# Altium footprint library LM1117MPX-33NOPB.PcbLib: 3 footprints
Each footprint in its own frame and in the unit in brackets; x right, y up, seen from the top. Pads: shape width x height; smd on the part's side, far side on the other; paste and mask are expansions set on the pad; w line width, h text height; cw(c..) or ccw(c..) is an arc to the next point about the centre after c.
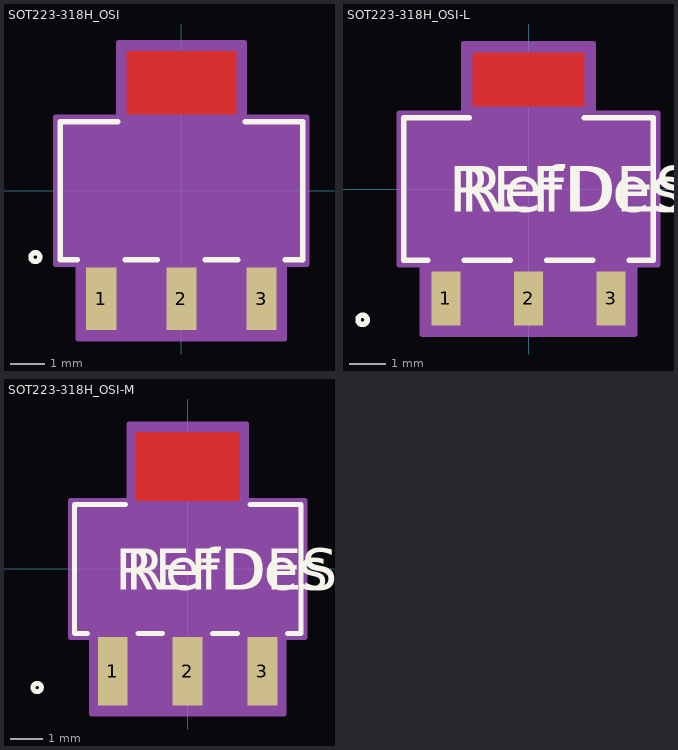
[diagram p0: the footprints below, top view; thin cyan lines are the x and y axes]

## SOT223-318H_OSI [mil]
pads (3):
  rect 34x71 smd paste+0 mask+0: 1(-90.55,-122) 2(0,-122) 3(90.55,-122)
Top Layer:
  region: 62,86.5 62,157.5 -62,157.5 -62,86.5
Top Overlay:
  circle w6: c-165,-75 r5
  lines w6: -117.52,-78 -137,-78 -137,78 -71.97,78 ; -63.58,-78 -26.97,-78 ; 26.97,-78 63.58,-78 ; 71.97,78 137,78 137,-78 117.52,-78
Top Paste:
  region: 62,86.5 62,157.5 -62,157.5 -62,86.5
Top Solder:
  region: 63,72.5 63,171.5 -63,171.5 -63,72.5
Mechanical 13:
  circle w0: c-122,-63 r5
  lines w1: -132,-73 132,-73 132,73 -132,73 -132,-73 ; -106.55,-143.5 -106.55,-73 -74.55,-73 -74.55,-143.5 -106.55,-143.5 ; -61,73 61,73 61,143.5 -61,143.5 -61,73 ; -16,-143.5 -16,-73 16,-73 16,-143.5 -16,-143.5 ; 74.55,-143.5 74.55,-73 106.55,-73 106.55,-143.5 74.55,-143.5
Mechanical 15:
  region: -142,-83 -142,83 -71,83 -71,167.5 71,167.5 71,83 142,83 142,-83 116.55,-83 116.55,-167.5 -116.55,-167.5 -116.55,-83
  lines w6: -142,-83 -142,83 -71,83 -71,167.5 71,167.5 71,83 142,83 142,-83 116.55,-83 116.55,-167.5 -116.55,-167.5 -116.55,-83 -142,-83
3D body "SOT223-318H_OSI.step": height 71.1, standoff 0, extent -132.01,-143.5 132.01,143.5

## SOT223-318H_OSI-L [mil]
pads (3):
  rect 32x59 smd paste+0 mask+0: 1(-90.55,-120) 2(0,-120) 3(90.55,-120)
Top Layer:
  region: 61,90.5 61,149.5 -61,149.5 -61,90.5
Top Overlay:
  circle w6: c-182,-143.5 r5
  lines w6: -110.47,-78 -137,-78 -137,78 -64.92,78 ; -70.63,-78 -19.92,-78 ; 19.92,-78 70.63,-78 ; 61,78 137,78 137,-78 110.47,-78
  text "REFDES" at -87.5,-25 h50
  text "RefDes" at -75,-25 h50
Top Paste:
  region: 61,90.5 61,149.5 -61,149.5 -61,90.5
Top Solder:
  region: 61,80.5 61,155.5 -61,155.5 -61,80.5
Mechanical 13:
  circle w0: c-122,-63 r5
  lines w1: -132,-73 132,-73 132,73 -132,73 -132,-73 ; -106.55,-143.5 -106.55,-73 -74.55,-73 -74.55,-143.5 -106.55,-143.5 ; -61,73 61,73 61,143.5 -61,143.5 -61,73 ; -16,-143.5 -16,-73 16,-73 16,-143.5 -16,-143.5 ; 74.55,-143.5 74.55,-73 106.55,-73 106.55,-143.5 74.55,-143.5
  text "RefDes2" at -87.5,-25 h50
Mechanical 15:
  region: -142,-83 -142,83 -71,83 -71,159.5 71,159.5 71,83 142,83 142,-83 116.55,-83 116.55,-159.5 -116.55,-159.5 -116.55,-83
  lines w6: -142,-83 -142,83 -71,83 -71,159.5 71,159.5 71,83 142,83 142,-83 116.55,-83 116.55,-159.5 -116.55,-159.5 -116.55,-83 -142,-83
3D body "SOT223-318H_OSI.step": height 71.1, standoff 0, extent -132.01,-143.5 132.01,143.5

## SOT223-318H_OSI-M [mil]
pads (3):
  rect 36x83 smd paste+0 mask+0: 1(-90.55,-124) 2(0,-124) 3(90.55,-124)
Top Layer:
  region: 63,82.5 63,165.5 -63,165.5 -63,82.5
Top Overlay:
  circle w6: c-182,-143.5 r5
  lines w6: -120.85,-78 -137,-78 -137,78 -75.3,78 ; -60.25,-78 -30.3,-78 ; 30.3,-78 60.25,-78 ; 75.3,78 137,78 137,-78 120.85,-78
  text "REFDES" at -87.5,-25 h50
  text "RefDes" at -75,-25 h50
Top Paste:
  region: 63,82.5 63,165.5 -63,165.5 -63,82.5
Top Solder:
  region: 65,64.5 65,187.5 -65,187.5 -65,64.5
Mechanical 13:
  circle w0: c-122,-63 r5
  lines w1: -132,-73 132,-73 132,73 -132,73 -132,-73 ; -106.55,-143.5 -106.55,-73 -74.55,-73 -74.55,-143.5 -106.55,-143.5 ; -61,73 61,73 61,143.5 -61,143.5 -61,73 ; -16,-143.5 -16,-73 16,-73 16,-143.5 -16,-143.5 ; 74.55,-143.5 74.55,-73 106.55,-73 106.55,-143.5 74.55,-143.5
  text "RefDes2" at -87.5,-25 h50
Mechanical 15:
  region: -142,-83 -142,83 -71,83 -71,175.5 71,175.5 71,83 142,83 142,-83 116.55,-83 116.55,-175.5 -116.55,-175.5 -116.55,-83
  lines w6: -142,-83 -142,83 -71,83 -71,175.5 71,175.5 71,83 142,83 142,-83 116.55,-83 116.55,-175.5 -116.55,-175.5 -116.55,-83 -142,-83
3D body "SOT223-318H_OSI.step": height 71.1, standoff 0, extent -132.01,-143.5 132.01,143.5